# Altium schematic symbol library WS2812B-V5.SchLib: 1 symbol
Pins are listed as number, name and electrical type; pins without a type are passive.

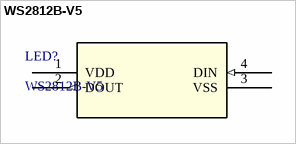
[diagram p0: symbol WS2812B-V5]

## WS2812B-V5
designator LED?
ADDRESS LED RED/GRN/BLUE; Manufacturer_Name: Sparkfun; Manufacturer_Part_Number: COM-16347; Type: LED Addressable; Copyright: Copyright (C) 2026 Ultra Librarian. All rights reserved.; RefDes: RefDes
footprint COM-16347_SPK
footprint WS2812B-V5 (ADDRESS LED RED/GRN/BLUE)
pins: 1 VDD (power), 2 DOUT (out), 3 VSS (power), 4 DIN (in)